# Altium footprint library Pad Connector.PcbLib: 1 footprints
Each footprint in its own frame and in the unit in brackets; x right, y up, seen from the top. Pads: shape width x height; smd on the part's side, far side on the other; paste and mask are expansions set on the pad; w line width, h text height; cw(c..) or ccw(c..) is an arc to the next point about the centre after c.
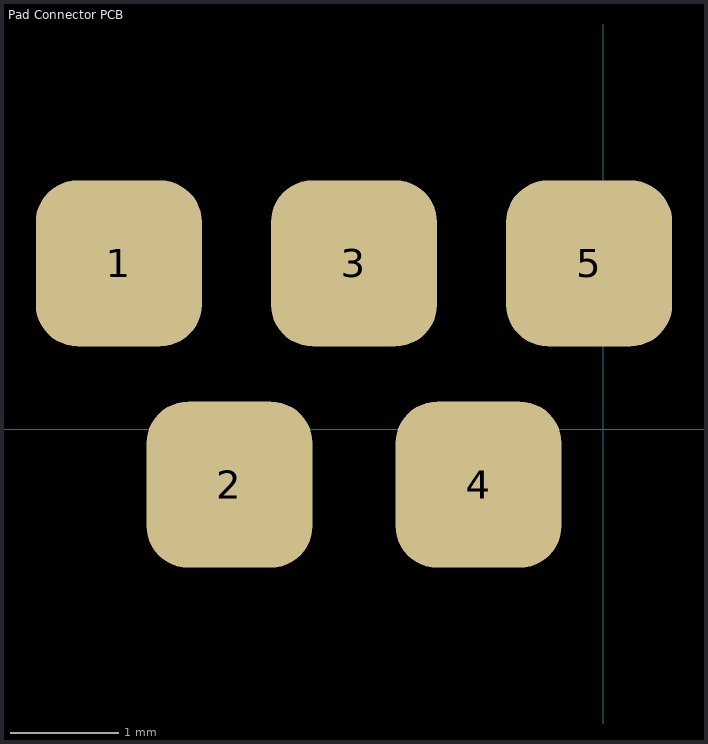
[diagram p0: the footprint, top view; thin cyan lines are the x and y axes]

## Pad Connector PCB [mil]
pads (5):
  rrect50% 60x60 smd: 1(-175,60) 2(-135,-20) 3(-90,60) 4(-45,-20) 5(-5,60)